# Altium footprint library Footprint-Lib-PhilsLab.PcbLib: 544 footprints (part 22 of 34)
Each footprint in its own frame and in the unit in brackets; x right, y up, seen from the top. Pads: shape width x height; smd on the part's side, far side on the other; paste and mask are expansions set on the pad; w line width, h text height; cw(c..) or ccw(c..) is an arc to the next point about the centre after c.
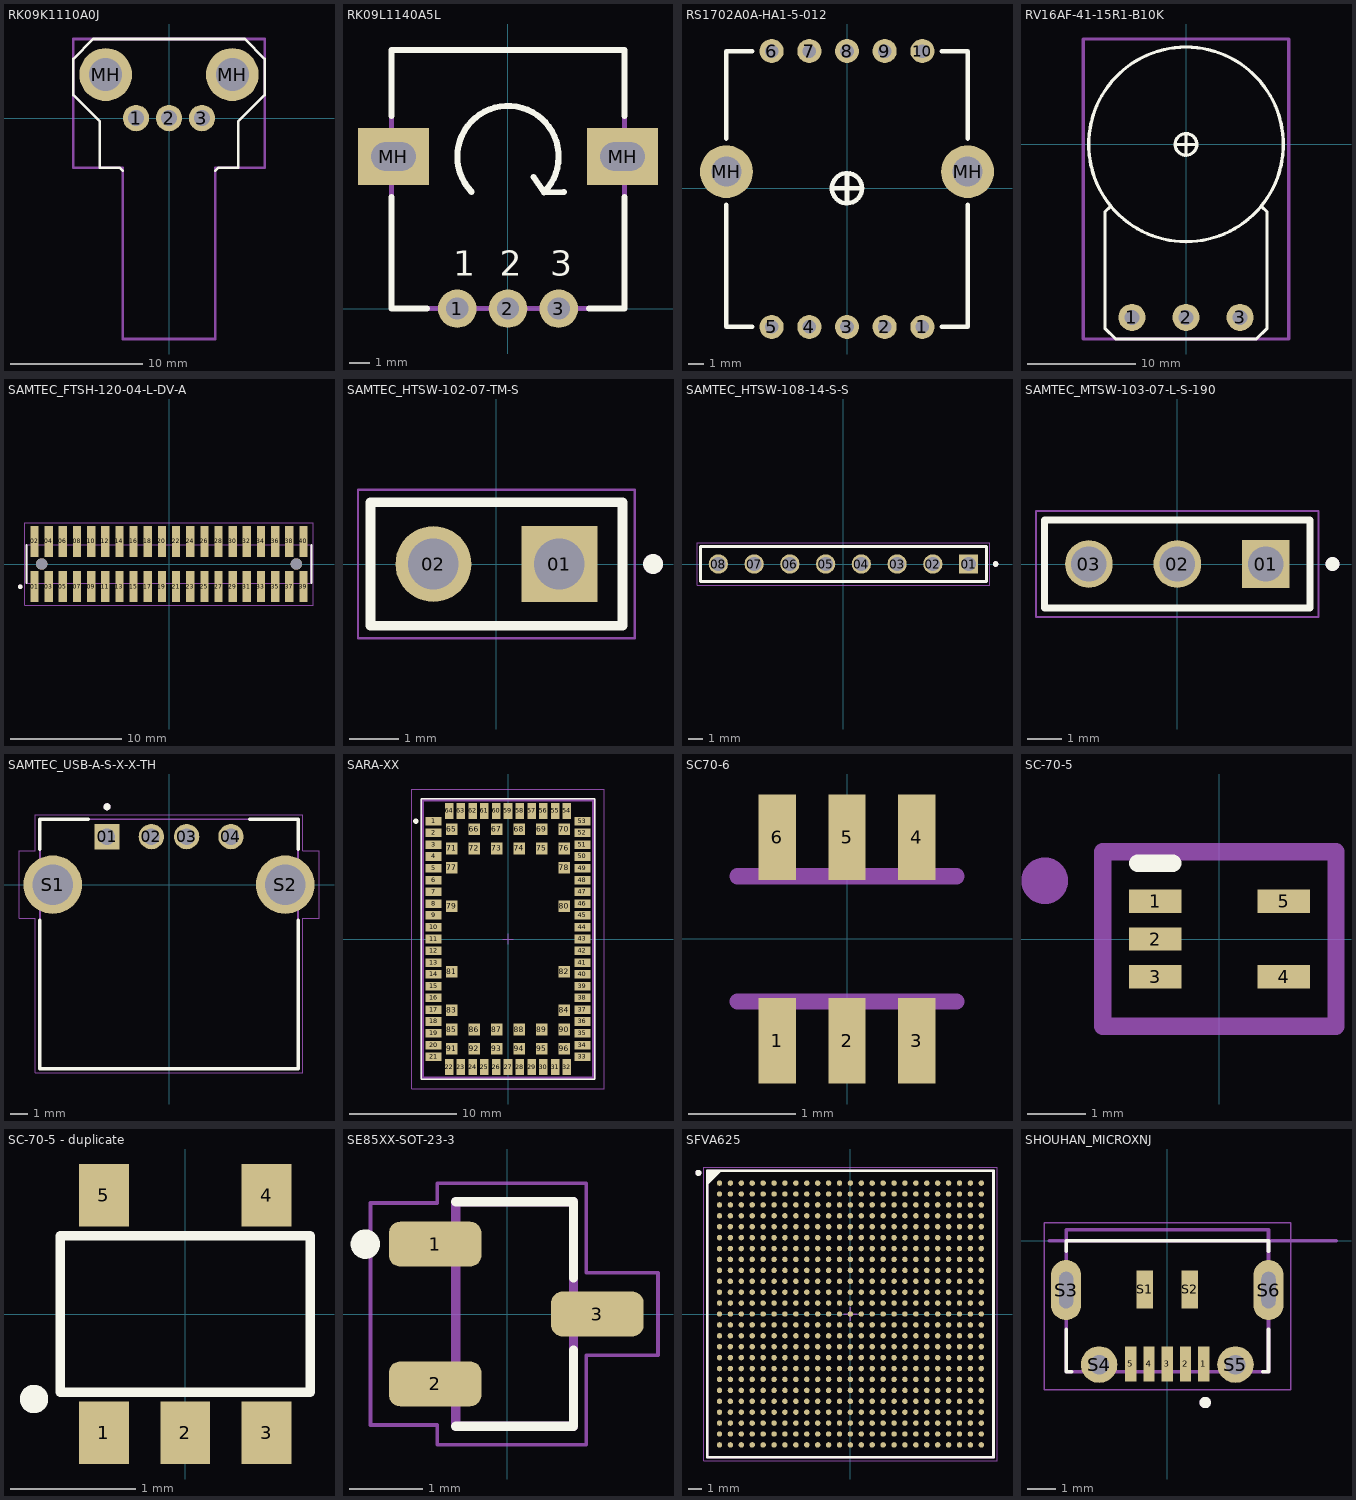
[diagram p21: the footprints below, top view; thin cyan lines are the x and y axes]

## RK09K1110A0J [mm]
pads (5):
  round 2 hole 1.2 mask+0.07: 1(-2.5,0) 2(0,0) 3(2.5,0)
  round 4 hole 2.5 mask+0.07: MH(-4.8,3.3) MH(4.8,3.3)
Top Overlay:
  lines w0.2: -3.5,-4 -3.75,-3.75 -5.25,-3.75 -5.25,-0.25 -7.25,1.75 -7.25,4.5 -5.75,6 -5.5,6 5.75,6 7.25,4.5 7.25,1.75 5.25,-0.25 5.25,-3.75 3.75,-3.75 3.5,-4
Mechanical 13:
  lines w0.2: -7.25,-3.75 -3.5,-3.75 -3.5,-16.75 3.5,-16.75 3.5,-3.75 7.25,-3.75 7.25,6 -7.25,6 -7.25,-3.75
  text "'.Designator'" at -7.231,-1.087 h1.25
3D body "RK09K1110-20.STEP": height 12.01, standoff -3.79, extent -4.9,-16.65 4.9,5.65

## RK09L1140A5L [mm]
pads (5):
  round 1.9 hole 1.1: 1(-2.5,0) 2(0,0) 3(2.5,0)
  rect 3.5x2.8 hole 1.4 slot 2.2 at 0 deg: MH(-5.65,7.5) MH(5.65,7.5)
Top Overlay:
  lines w0.3: -5.75,5.5 -5.75,0 -4,0 ; -5.75,9.5 -5.75,12.75 5.75,12.75 5.75,9.5 ; -1.798,5.763 cw(c0,7.5) 1.768,5.732 ; 1.25,6.5 1.768,5.732 ; 2.75,5.75 1.768,5.732 ; 4,0 5.75,0 5.75,5.5
  text "1" at -2.708,1.625 h1.25
  text "2" at -0.417,1.625 h1.25
  text "3" at 2.083,1.625 h1.25
Mechanical 13:
  lines w0.254: -5.75,0 -5.75,12.75 5.75,12.75 5.75,0 -5.75,0
  text "'.Designator'" at -5.665,7.083 h1
  text "1" at -2.667,1.75 h1
  text "2" at -0.333,1.75 h1
  text "3" at 2.167,1.75 h1
3D body "RK09L1140-F15.STEP": height 25.01, standoff -3.49, extent -6.048,-0.15 6.05,12.35

## RS1702A0A-HA1-5-012 [mm]
pads (12):
  round 1.6 hole 0.9: 1(5,-9.2) 2(2.5,-9.2) 3(0,-9.2) 4(-2.5,-9.2) 5(-5,-9.2) 6(-5,9.1) 7(-2.5,9.1) 8(0,9.1) 9(2.5,9.1) 10(5,9.1)
  round 3.5 hole 2: MH(-8,1.1) MH(8,1.1)
Top Overlay:
  circle w0.3: c0,0 r1
  lines w0.3: -8,-1.1 -8,-9.2 -6.3,-9.2 ; -8,3.3 -8,9.1 -6.3,9.1 ; -1,0 1,0 ; 0,-1 0,1 ; 6.3,-9.2 8,-9.2 8,-1.1 ; 6.3,9.1 8,9.1 8,3.3

## RV16AF-41-15R1-B10K [mm]
pads (3):
  round 2.5 hole 1.4: 1(-5,-16) 2(0,-16) 3(5,-16)
Top Overlay:
  circle w0.3: c0,0 r1
  circle w0.3: c0,0 r9
  lines w0.3: -7,-5.75 -7.5,-6.25 -7.5,-17 -6.5,-18 0,-18 6.5,-18 7.5,-17 7.5,-6.25 7,-5.75 ; -1,0 1,0 ; 0,-1 0,1
Mechanical 13:
  lines w0.3: -9.5,-18 -9.5,9.75 9.5,9.75 9.5,-18 0,-18 -9.5,-18
  text "'.Designator'" at -5.815,-0.9 h1
3D body "RV16AF-41-15R1-B10K.step": height 25.91, standoff -4.99, extent -8.5,-16.25 8.5,8.5

## SAMTEC_FTSH-120-04-L-DV-A [mm]
pads (42):
  rect 0.74x2.79 smd: 01(-12.065,-2.035) 02(-12.065,2.035) 03(-10.795,-2.035) 04(-10.795,2.035) 05(-9.525,-2.035) 06(-9.525,2.035) 07(-8.255,-2.035) 08(-8.255,2.035) 09(-6.985,-2.035) 10(-6.985,2.035) 11(-5.715,-2.035) 12(-5.715,2.035) 13(-4.445,-2.035) 14(-4.445,2.035) 15(-3.175,-2.035) 16(-3.175,2.035) 17(-1.905,-2.035) 18(-1.905,2.035) 19(-0.635,-2.035) 20(-0.635,2.035) 21(0.635,-2.035) 22(0.635,2.035) 23(1.905,-2.035) 24(1.905,2.035) 25(3.175,-2.035) 26(3.175,2.035) 27(4.445,-2.035) 28(4.445,2.035) 29(5.715,-2.035) 30(5.715,2.035) 31(6.985,-2.035) 32(6.985,2.035) 33(8.255,-2.035) 34(8.255,2.035) 35(9.525,-2.035) 36(9.525,2.035) 37(10.795,-2.035) 38(10.795,2.035) 39(12.065,-2.035) 40(12.065,2.035)
  round 1.02 hole 1.02 unplated: ""(-11.43,0) ""(11.43,0)
Top Overlay:
  circle w0.2: c-13.35,-2.035 r0.1
  lines w0.2: -12.785,-1.715 -12.785,1.715 ; 12.785,-1.715 12.785,1.715
Mechanical 13:
  circle w0.2: c-13.35,-2.035 r0.1
  lines w0.1: -12.7,-1.715 -12.7,1.715 ; -12.7,-1.715 12.7,-1.715 ; -12.7,-1.715 -12.7,1.715 ; -12.7,1.715 12.7,1.715 ; -12.7,1.715 12.7,1.715 ; 12.7,-1.715 12.7,1.715 ; 12.7,-1.715 12.7,1.715
Mechanical 15:
  lines w0.05: -12.95,-3.68 -12.95,3.68 12.95,3.68 12.95,-3.68 -12.95,-3.68
3D body "FTSH-120-04-L-DV-A.stp": height 6.82, standoff -0.77, extent -12.7,-2.921 12.7,2.921

## SAMTEC_HTSW-102-07-TM-S [mm]
pads (2):
  rect 1.53x1.53 hole 1.02: 01(1.27,0)
  round 1.53 hole 1.02: 02(-1.27,0)
Top Overlay:
  circle w0.2: c3.16,0 r0.1
  lines w0.2: -2.54,-1.245 -2.54,1.245 2.54,1.245 2.54,-1.245 -2.54,-1.245
Mechanical 13:
  circle w0.2: c3.16,0 r0.1
  lines w0.1: -2.54,-1.245 -2.54,1.245 2.54,1.245 2.54,-1.245 -2.54,-1.245
Mechanical 15:
  lines w0.05: -2.79,-1.495 -2.79,1.495 2.79,1.495 2.79,-1.495 -2.79,-1.495

## SAMTEC_HTSW-108-14-S-S [mm]
pads (8):
  rect 1.37x1.37 hole 1.02: 01(8.89,0)
  round 1.37 hole 1.02: 02(6.35,0) 03(3.81,0) 04(1.27,0) 05(-1.27,0) 06(-3.81,0) 07(-6.35,0) 08(-8.89,0)
Top Overlay:
  circle w0.2: c10.81,0 r0.1
  lines w0.2: -10.16,-1.245 -10.16,1.245 10.16,1.245 10.16,-1.245 -10.16,-1.245
Mechanical 13:
  circle w0.2: c10.81,0 r0.1
  lines w0.1: -10.16,-1.245 -10.16,1.245 10.16,1.245 10.16,-1.245 -10.16,-1.245
Mechanical 15:
  lines w0.05: -10.41,-1.495 -10.41,1.495 10.41,1.495 10.41,-1.495 -10.41,-1.495

## SAMTEC_MTSW-103-07-L-S-190 [mm]
pads (3):
  rect 1.37x1.37 / inner round 1.37 / far side rect 1.37x1.37 hole 1.02: 01(2.54,0)
  round 1.37 hole 1.02: 02(0,0) 03(-2.54,0)
Top Overlay:
  circle w0.2: c4.46,0 r0.1
  lines w0.2: -3.81,-1.27 -3.81,1.27 3.81,1.27 3.81,-1.27 -3.81,-1.27
Mechanical 13:
  circle w0.2: c4.46,0 r0.1
  lines w0.1: -3.81,-1.27 -3.81,1.27 ; -3.81,-1.27 3.81,-1.27 ; -3.81,-1.27 -3.81,1.27 ; -3.81,1.27 3.81,1.27 ; -3.81,1.27 3.81,1.27 ; 3.81,-1.27 3.81,1.27 ; 3.81,-1.27 3.81,1.27
Mechanical 15:
  lines w0.05: -4.06,-1.52 -4.06,1.52 4.06,1.52 4.06,-1.52 -4.06,-1.52

## SAMTEC_USB-A-S-X-X-TH [mm]
height 7.08
pads (6):
  rect 1.428x1.428 / inner round 1.428 / far side rect 1.428x1.428 hole 0.92: 01(-3.5,2.71)
  round 1.428 hole 0.92: 02(-1,2.71) 03(1,2.71) 04(3.5,2.71)
  round 3.316 hole 2.3: S1(-6.57,0) S2(6.57,0)
Top Overlay:
  circle w0.2: c-3.5,4.4 r0.1
  lines w0.2: -7.3,-2.01 -7.3,-10.4 7.3,-10.4 7.3,-2.01 ; -7.3,2.01 -7.3,3.7 -4.565,3.7 ; 4.565,3.7 7.3,3.7 7.3,2.01
Mechanical 13:
  circle w0.2: c-3.5,4.4 r0.1
  lines w0.1: -7.3,-10.4 7.3,-10.4 7.3,3.7 -7.3,3.7 -7.3,-10.4
Mechanical 15:
  lines w0.05: -8.48,-1.91 -7.55,-1.91 -7.55,-10.65 7.55,-10.65 7.55,-1.91 8.48,-1.91 8.48,1.91 7.55,1.91 7.55,3.95 -7.55,3.95 -7.55,1.91 -8.48,1.91 -8.48,-1.91
3D body "USB-A-S-S-B-TH-R.stp": height 7.47, standoff -4.42, extent -7.774,-10.55 7.974,3.55

## SARA-XX [mm] "GSM/GPRS and GSM/EGPRS/HSPA Cellular Module"
height 3.25
pads (96):
  rect 1.5x0.8 smd mask+0.22: 1(-6.95,11) 2(-6.95,9.9) 3(-6.95,8.8) 4(-6.95,7.7) 5(-6.95,6.6) 6(-6.95,5.5) 7(-6.95,4.4) 8(-6.95,3.3) 9(-6.95,2.2) 10(-6.95,1.1) 11(-6.95,0) 12(-6.95,-1.1) 13(-6.95,-2.2) 14(-6.95,-3.3) 15(-6.95,-4.4) 16(-6.95,-5.5) 17(-6.95,-6.6) 18(-6.95,-7.7) 19(-6.95,-8.8) 20(-6.95,-9.9) 21(-6.95,-11) 33(6.95,-11) 34(6.95,-9.9) 35(6.95,-8.8) 36(6.95,-7.7) 37(6.95,-6.6) 38(6.95,-5.5) 39(6.95,-4.4) 40(6.95,-3.3) 41(6.95,-2.2) 42(6.95,-1.1) 43(6.95,0) 44(6.95,1.1) 45(6.95,2.2) 46(6.95,3.3) 47(6.95,4.4) 48(6.95,5.5) 49(6.95,6.6) 50(6.95,7.7) 51(6.95,8.8) 52(6.95,9.9) 53(6.95,11)
  rect 0.8x1.5 smd mask+0.22: 22(-5.5,-11.95) 23(-4.4,-11.95) 24(-3.3,-11.95) 25(-2.2,-11.95) 26(-1.1,-11.95) 27(0,-11.95) 28(1.1,-11.95) 29(2.2,-11.95) 30(3.3,-11.95) 31(4.4,-11.95) 32(5.5,-11.95) 54(5.5,11.95) 55(4.4,11.95) 56(3.3,11.95) 57(2.2,11.95) 58(1.1,11.95) 59(0,11.95) 60(-1.1,11.95) 61(-2.2,11.95) 62(-3.3,11.95) 63(-4.4,11.95) 64(-5.5,11.95)
  rect 1.1x1.1 smd mask+0.22: 65(-5.25,10.25) 66(-3.15,10.25) 67(-1.05,10.25) 68(1.05,10.25) 69(3.15,10.25) 70(5.25,10.25) 71(-5.25,8.45) 72(-3.15,8.45) 73(-1.05,8.45) 74(1.05,8.45) 75(3.15,8.45) 76(5.25,8.45) 77(-5.25,6.65) 78(5.25,6.65) 79(-5.25,3.05) 80(5.25,3.05) 81(-5.25,-3.05) 82(5.25,-3.05) 83(-5.25,-6.65) 84(5.25,-6.65) 85(-5.25,-8.45) 86(-3.15,-8.45) 87(-1.05,-8.45) 88(1.05,-8.45) 89(3.15,-8.45) 90(5.25,-8.45) 91(-5.25,-10.25) 92(-3.15,-10.25) 93(-1.05,-10.25) 94(1.05,-10.25) 95(3.15,-10.25) 96(5.25,-10.25)
Top Overlay:
  circle w0.4: c-8.6,11 r0.05
  lines w0.15: -8.1,-13.1 -8.1,13.1 8.1,13.1 8.1,-13.1 -8.1,-13.1
Mechanical 13:
  circle w0.4: c-7,11 r0.05
  lines w0.3: -8,-13 -8,13 8,13 8,-13 -8,-13
  text "'.Designator'" at -5.815,-0.9 h1
Mechanical 15:
  lines w0.05: -9,-14 -9,14 9,14 9,-14 -9,-14
  lines w0.1: -0.5,0 0,0 0.5,0 ; 0,-0.5 0,0.5
3D body "SARA-R5xx.STEP": height 2.23, standoff 0.03, extent -7.998,-12.999 8.002,13.001

## SC70-6 [mm]
pads (6):
  rect 0.35x0.8 smd paste-1 mask+0: 1(-0.65,-0.95) 2(0,-0.95) 3(0.65,-0.95) 4(0.65,0.95) 5(0,0.95) 6(-0.65,0.95)
Top Paste:
  region: -0.5,-1.326 -0.801,-1.326 -0.801,-0.575 -0.5,-0.575
  region: 0.15,-1.326 -0.15,-1.326 -0.15,-0.575 0.15,-0.575
  region: 0.8,-1.326 0.5,-1.326 0.5,-0.575 0.8,-0.575
  region: 0.8,0.575 0.5,0.575 0.5,1.325 0.8,1.325
  region: 0.15,0.575 -0.15,0.575 -0.15,1.325 0.15,1.325
  region: -0.5,0.576 -0.802,0.576 -0.802,1.325 -0.5,1.325
Top Solder:
  region: -0.425,-1.401 -0.875,-1.401 -0.875,-0.5 -0.425,-0.5
  region: 0.225,-1.401 -0.225,-1.401 -0.225,-0.5 0.225,-0.5
  region: 0.875,-1.402 0.426,-1.402 0.426,-0.5 0.875,-0.5
  region: 0.875,0.5 0.425,0.5 0.425,1.4 0.875,1.4
  region: 0.225,0.501 -0.225,0.501 -0.225,1.4 0.225,1.4
  region: -0.425,0.5 -0.875,0.5 -0.875,1.4 -0.425,1.4
Mechanical 13:
  region: 0.15,-1.2 -0.15,-1.2 -0.15,-0.625 0.15,-0.625
  region: -0.5,-1.202 -0.801,-1.202 -0.801,-0.625 -0.5,-0.625
  region: 0.8,-1.201 0.5,-1.201 0.5,-0.625 0.8,-0.625
  region: 0.8,0.626 0.501,0.626 0.501,1.2 0.8,1.2
  region: 0.15,0.626 -0.15,0.626 -0.15,1.2 0.15,1.2
  region: -0.5,0.626 -0.801,0.626 -0.801,1.2 -0.5,1.2
  lines w0.152: -1.022,-0.585 1.022,-0.585 ; -1.022,0.585 1.022,0.585

## SC-70-5 [mm]
pads (5):
  rect 0.9x0.4 smd mask+0.15: 1(-1.1,0.65) 2(-1.1,0) 3(-1.1,-0.65) 4(1.1,-0.65) 5(1.1,0.65)
Top Overlay:
  lines w0.3: -1.4,1.3 -0.8,1.3
Mechanical 13:
  circle w0.5: c-3,1 r0.149
  lines w0.3: -2,-1.5 2,-1.5 2,1.5 -2,1.5 -2,-1.5
  text "'.Designator'" at -5.815,-0.9 h1
3D body "SC-70-5.step": height 0.96, standoff 0.01, extent -1.05,-1 1.05,1

## SC-70-5 - duplicate [mm]
pads (5):
  rect 0.4x0.5 smd: 1(-0.65,-0.95) 2(0,-0.95) 3(0.65,-0.95) 4(0.65,0.95) 5(-0.65,0.95)
Top Overlay:
  circle w0.127: c-1.21,-0.68 r0.05
  lines w0.076: -1,-0.625 1,-0.625 1,0.625 -1,0.625 -1,-0.625
3D body "step_temp.STEP": height 1.1, standoff 0, extent -1.05,-1 1.05,1

## SE85XX-SOT-23-3 [mm]
pads (3):
  rrect50% 1.26x0.61 smd: 1(-0.98,0.95) 2(-0.98,-0.95) 3(1.225,0)
Top Overlay:
  circle w0.2: c-1.93,0.95 r0.1
  lines w0.127: -0.7,-1.525 0.9,-1.525 0.9,-0.489 ; -0.7,1.525 0.9,1.525 0.9,0.489
Mechanical 13:
  lines w0.127: -0.7,-1.525 0.9,-1.525 0.9,1.525 -0.7,1.525 -0.7,-1.525
Mechanical 15:
  lines w0.05: -1.86,-1.51 -0.95,-1.51 -0.95,-1.78 1.075,-1.78 1.075,-0.56 2.05,-0.56 2.05,0.56 1.075,0.56 1.075,1.78 -0.95,1.78 -0.95,1.51 -1.86,1.51 -1.86,-1.51

## SFVA625 [mm]
height 3.43
pads (625):
  round 0.4 smd mask+0.08: A1(-9.6,9.6) A2(-8.8,9.6) A3(-8,9.6) A4(-7.2,9.6) A5(-6.4,9.6) A6(-5.6,9.6) A7(-4.8,9.6) A8(-4,9.6) A9(-3.2,9.6) A10(-2.4,9.6) A11(-1.6,9.6) A12(-0.8,9.6) A13(0,9.6) A14(0.8,9.6) A15(1.6,9.6) A16(2.4,9.6) A17(3.2,9.6) A18(4,9.6) A19(4.8,9.6) A20(5.6,9.6) A21(6.4,9.6) A22(7.2,9.6) A23(8,9.6) A24(8.8,9.6) A25(9.6,9.6) AA1(-9.6,-6.4) AA2(-8.8,-6.4) AA3(-8,-6.4) AA4(-7.2,-6.4) AA5(-6.4,-6.4) AA6(-5.6,-6.4) AA7(-4.8,-6.4) AA8(-4,-6.4) AA9(-3.2,-6.4) AA10(-2.4,-6.4) AA11(-1.6,-6.4) AA12(-0.8,-6.4) AA13(0,-6.4) AA14(0.8,-6.4) AA15(1.6,-6.4) AA16(2.4,-6.4) AA17(3.2,-6.4) AA18(4,-6.4) AA19(4.8,-6.4) AA20(5.6,-6.4) AA21(6.4,-6.4) AA22(7.2,-6.4) AA23(8,-6.4) AA24(8.8,-6.4) AA25(9.6,-6.4) AB1(-9.6,-7.2) AB2(-8.8,-7.2) AB3(-8,-7.2) AB4(-7.2,-7.2) AB5(-6.4,-7.2) AB6(-5.6,-7.2) AB7(-4.8,-7.2) AB8(-4,-7.2) AB9(-3.2,-7.2) AB10(-2.4,-7.2) AB11(-1.6,-7.2) AB12(-0.8,-7.2) AB13(0,-7.2) AB14(0.8,-7.2) AB15(1.6,-7.2) AB16(2.4,-7.2) AB17(3.2,-7.2) AB18(4,-7.2) AB19(4.8,-7.2) AB20(5.6,-7.2) AB21(6.4,-7.2) AB22(7.2,-7.2) AB23(8,-7.2) AB24(8.8,-7.2) AB25(9.6,-7.2) AC1(-9.6,-8) AC2(-8.8,-8) AC3(-8,-8) AC4(-7.2,-8) AC5(-6.4,-8) AC6(-5.6,-8) AC7(-4.8,-8) AC8(-4,-8) AC9(-3.2,-8) AC10(-2.4,-8) AC11(-1.6,-8) AC12(-0.8,-8) AC13(0,-8) AC14(0.8,-8) AC15(1.6,-8) AC16(2.4,-8) AC17(3.2,-8) AC18(4,-8) AC19(4.8,-8) AC20(5.6,-8) AC21(6.4,-8) AC22(7.2,-8) AC23(8,-8) AC24(8.8,-8) AC25(9.6,-8) AD1(-9.6,-8.8) AD2(-8.8,-8.8) AD3(-8,-8.8) AD4(-7.2,-8.8) AD5(-6.4,-8.8) AD6(-5.6,-8.8) AD7(-4.8,-8.8) AD8(-4,-8.8) AD9(-3.2,-8.8) AD10(-2.4,-8.8) AD11(-1.6,-8.8) AD12(-0.8,-8.8) AD13(0,-8.8) AD14(0.8,-8.8) AD15(1.6,-8.8) AD16(2.4,-8.8) AD17(3.2,-8.8) AD18(4,-8.8) AD19(4.8,-8.8) AD20(5.6,-8.8) AD21(6.4,-8.8) AD22(7.2,-8.8) AD23(8,-8.8) AD24(8.8,-8.8) AD25(9.6,-8.8) AE1(-9.6,-9.6) AE2(-8.8,-9.6) AE3(-8,-9.6) AE4(-7.2,-9.6) AE5(-6.4,-9.6) AE6(-5.6,-9.6) AE7(-4.8,-9.6) AE8(-4,-9.6) AE9(-3.2,-9.6) AE10(-2.4,-9.6) AE11(-1.6,-9.6) AE12(-0.8,-9.6) AE13(0,-9.6) AE14(0.8,-9.6) AE15(1.6,-9.6) AE16(2.4,-9.6) AE17(3.2,-9.6) AE18(4,-9.6) AE19(4.8,-9.6) AE20(5.6,-9.6) AE21(6.4,-9.6) AE22(7.2,-9.6) AE23(8,-9.6) AE24(8.8,-9.6) AE25(9.6,-9.6) B1(-9.6,8.8) B2(-8.8,8.8) B3(-8,8.8) B4(-7.2,8.8) B5(-6.4,8.8) B6(-5.6,8.8) B7(-4.8,8.8) B8(-4,8.8) B9(-3.2,8.8) B10(-2.4,8.8) B11(-1.6,8.8) B12(-0.8,8.8) B13(0,8.8) B14(0.8,8.8) B15(1.6,8.8) B16(2.4,8.8) B17(3.2,8.8) B18(4,8.8) B19(4.8,8.8) B20(5.6,8.8) B21(6.4,8.8) B22(7.2,8.8) B23(8,8.8) B24(8.8,8.8) B25(9.6,8.8) C1(-9.6,8) C2(-8.8,8) C3(-8,8) C4(-7.2,8) C5(-6.4,8) C6(-5.6,8) C7(-4.8,8) C8(-4,8) C9(-3.2,8) C10(-2.4,8) C11(-1.6,8) C12(-0.8,8) C13(0,8) C14(0.8,8) C15(1.6,8) C16(2.4,8) C17(3.2,8) C18(4,8) C19(4.8,8) C20(5.6,8) C21(6.4,8) C22(7.2,8) C23(8,8) C24(8.8,8) C25(9.6,8) D1(-9.6,7.2) D2(-8.8,7.2) D3(-8,7.2) D4(-7.2,7.2) D5(-6.4,7.2) D6(-5.6,7.2) D7(-4.8,7.2) D8(-4,7.2) D9(-3.2,7.2) D10(-2.4,7.2) D11(-1.6,7.2) D12(-0.8,7.2) D13(0,7.2) D14(0.8,7.2) D15(1.6,7.2) D16(2.4,7.2) D17(3.2,7.2) D18(4,7.2) D19(4.8,7.2) D20(5.6,7.2) D21(6.4,7.2) D22(7.2,7.2) D23(8,7.2) D24(8.8,7.2) D25(9.6,7.2) E1(-9.6,6.4) E2(-8.8,6.4) E3(-8,6.4) E4(-7.2,6.4) E5(-6.4,6.4) E6(-5.6,6.4) E7(-4.8,6.4) E8(-4,6.4) E9(-3.2,6.4) E10(-2.4,6.4) E11(-1.6,6.4) E12(-0.8,6.4) E13(0,6.4) E14(0.8,6.4) E15(1.6,6.4) E16(2.4,6.4) E17(3.2,6.4) E18(4,6.4) E19(4.8,6.4) E20(5.6,6.4) E21(6.4,6.4) E22(7.2,6.4) E23(8,6.4) E24(8.8,6.4) E25(9.6,6.4) F1(-9.6,5.6) F2(-8.8,5.6) F3(-8,5.6) F4(-7.2,5.6) F5(-6.4,5.6) F6(-5.6,5.6) F7(-4.8,5.6) F8(-4,5.6) F9(-3.2,5.6) F10(-2.4,5.6) F11(-1.6,5.6) F12(-0.8,5.6) F13(0,5.6) F14(0.8,5.6) F15(1.6,5.6) F16(2.4,5.6) F17(3.2,5.6) F18(4,5.6) F19(4.8,5.6) F20(5.6,5.6) F21(6.4,5.6) F22(7.2,5.6) F23(8,5.6) F24(8.8,5.6) F25(9.6,5.6) G1(-9.6,4.8) G2(-8.8,4.8) G3(-8,4.8) G4(-7.2,4.8) G5(-6.4,4.8) G6(-5.6,4.8) G7(-4.8,4.8) G8(-4,4.8) G9(-3.2,4.8) G10(-2.4,4.8) G11(-1.6,4.8) G12(-0.8,4.8) G13(0,4.8) G14(0.8,4.8) G15(1.6,4.8) G16(2.4,4.8) G17(3.2,4.8) G18(4,4.8) G19(4.8,4.8) G20(5.6,4.8) G21(6.4,4.8) G22(7.2,4.8) G23(8,4.8) G24(8.8,4.8) G25(9.6,4.8) H1(-9.6,4) H2(-8.8,4) H3(-8,4) H4(-7.2,4) H5(-6.4,4) H6(-5.6,4) H7(-4.8,4) H8(-4,4) H9(-3.2,4) H10(-2.4,4) H11(-1.6,4) H12(-0.8,4) H13(0,4) H14(0.8,4) H15(1.6,4) H16(2.4,4) H17(3.2,4) H18(4,4) H19(4.8,4) H20(5.6,4) H21(6.4,4) H22(7.2,4) H23(8,4) H24(8.8,4) H25(9.6,4) J1(-9.6,3.2) J2(-8.8,3.2) J3(-8,3.2) J4(-7.2,3.2) J5(-6.4,3.2) J6(-5.6,3.2) J7(-4.8,3.2) J8(-4,3.2) J9(-3.2,3.2) J10(-2.4,3.2) J11(-1.6,3.2) J12(-0.8,3.2) J13(0,3.2) J14(0.8,3.2) J15(1.6,3.2) J16(2.4,3.2) J17(3.2,3.2) J18(4,3.2) J19(4.8,3.2) J20(5.6,3.2) J21(6.4,3.2) J22(7.2,3.2) J23(8,3.2) J24(8.8,3.2) J25(9.6,3.2) K1(-9.6,2.4) K2(-8.8,2.4) K3(-8,2.4) K4(-7.2,2.4) K5(-6.4,2.4) K6(-5.6,2.4) K7(-4.8,2.4) K8(-4,2.4) K9(-3.2,2.4) K10(-2.4,2.4) K11(-1.6,2.4) K12(-0.8,2.4) K13(0,2.4) K14(0.8,2.4) K15(1.6,2.4) K16(2.4,2.4) K17(3.2,2.4) K18(4,2.4) K19(4.8,2.4) K20(5.6,2.4) K21(6.4,2.4) K22(7.2,2.4) K23(8,2.4) K24(8.8,2.4) K25(9.6,2.4) L1(-9.6,1.6) L2(-8.8,1.6) L3(-8,1.6) L4(-7.2,1.6) L5(-6.4,1.6) L6(-5.6,1.6) L7(-4.8,1.6) L8(-4,1.6) L9(-3.2,1.6) L10(-2.4,1.6) L11(-1.6,1.6) L12(-0.8,1.6) L13(0,1.6) L14(0.8,1.6) L15(1.6,1.6) L16(2.4,1.6) L17(3.2,1.6) L18(4,1.6) L19(4.8,1.6) L20(5.6,1.6) L21(6.4,1.6) L22(7.2,1.6) L23(8,1.6) L24(8.8,1.6) L25(9.6,1.6) M1(-9.6,0.8) M2(-8.8,0.8) M3(-8,0.8) M4(-7.2,0.8) M5(-6.4,0.8) M6(-5.6,0.8) M7(-4.8,0.8) M8(-4,0.8) M9(-3.2,0.8) M10(-2.4,0.8) M11(-1.6,0.8) M12(-0.8,0.8) M13(0,0.8) M14(0.8,0.8) M15(1.6,0.8) M16(2.4,0.8) M17(3.2,0.8) M18(4,0.8) M19(4.8,0.8) M20(5.6,0.8) M21(6.4,0.8) M22(7.2,0.8) M23(8,0.8) M24(8.8,0.8) M25(9.6,0.8) N1(-9.6,0) N2(-8.8,0) N3(-8,0) N4(-7.2,0) N5(-6.4,0) N6(-5.6,0) N7(-4.8,0) N8(-4,0) N9(-3.2,0) N10(-2.4,0) N11(-1.6,0) N12(-0.8,0) N13(0,0) N14(0.8,0) N15(1.6,0) N16(2.4,0) N17(3.2,0) N18(4,0) N19(4.8,0) N20(5.6,0) N21(6.4,0) N22(7.2,0) N23(8,0) N24(8.8,0) N25(9.6,0) P1(-9.6,-0.8) P2(-8.8,-0.8) P3(-8,-0.8) P4(-7.2,-0.8) P5(-6.4,-0.8) P6(-5.6,-0.8) P7(-4.8,-0.8) P8(-4,-0.8) P9(-3.2,-0.8) P10(-2.4,-0.8) P11(-1.6,-0.8) P12(-0.8,-0.8) P13(0,-0.8) P14(0.8,-0.8) P15(1.6,-0.8) P16(2.4,-0.8) P17(3.2,-0.8) P18(4,-0.8) P19(4.8,-0.8) P20(5.6,-0.8) P21(6.4,-0.8) P22(7.2,-0.8) P23(8,-0.8) P24(8.8,-0.8) P25(9.6,-0.8) R1(-9.6,-1.6) R2(-8.8,-1.6) R3(-8,-1.6) R4(-7.2,-1.6) R5(-6.4,-1.6) R6(-5.6,-1.6) R7(-4.8,-1.6) R8(-4,-1.6) R9(-3.2,-1.6) R10(-2.4,-1.6) R11(-1.6,-1.6) R12(-0.8,-1.6) R13(0,-1.6) R14(0.8,-1.6) R15(1.6,-1.6) R16(2.4,-1.6) R17(3.2,-1.6) R18(4,-1.6) R19(4.8,-1.6) R20(5.6,-1.6) R21(6.4,-1.6) R22(7.2,-1.6) R23(8,-1.6) R24(8.8,-1.6) R25(9.6,-1.6) T1(-9.6,-2.4) T2(-8.8,-2.4) T3(-8,-2.4) T4(-7.2,-2.4) T5(-6.4,-2.4) T6(-5.6,-2.4) T7(-4.8,-2.4) T8(-4,-2.4) T9(-3.2,-2.4) T10(-2.4,-2.4) T11(-1.6,-2.4) T12(-0.8,-2.4) T13(0,-2.4) T14(0.8,-2.4) T15(1.6,-2.4) T16(2.4,-2.4) T17(3.2,-2.4) T18(4,-2.4) T19(4.8,-2.4) T20(5.6,-2.4) T21(6.4,-2.4) T22(7.2,-2.4) T23(8,-2.4) T24(8.8,-2.4) T25(9.6,-2.4) U1(-9.6,-3.2) U2(-8.8,-3.2) U3(-8,-3.2) U4(-7.2,-3.2) U5(-6.4,-3.2) U6(-5.6,-3.2) U7(-4.8,-3.2) U8(-4,-3.2) U9(-3.2,-3.2) U10(-2.4,-3.2) U11(-1.6,-3.2) U12(-0.8,-3.2) U13(0,-3.2) U14(0.8,-3.2) U15(1.6,-3.2) U16(2.4,-3.2) U17(3.2,-3.2) U18(4,-3.2) U19(4.8,-3.2) U20(5.6,-3.2) U21(6.4,-3.2) U22(7.2,-3.2) U23(8,-3.2) U24(8.8,-3.2) U25(9.6,-3.2) V1(-9.6,-4) V2(-8.8,-4) V3(-8,-4) V4(-7.2,-4) V5(-6.4,-4) V6(-5.6,-4) V7(-4.8,-4) V8(-4,-4) V9(-3.2,-4) V10(-2.4,-4) V11(-1.6,-4) V12(-0.8,-4) V13(0,-4) V14(0.8,-4) V15(1.6,-4) V16(2.4,-4) V17(3.2,-4) V18(4,-4) V19(4.8,-4) V20(5.6,-4) V21(6.4,-4) V22(7.2,-4) V23(8,-4) V24(8.8,-4) V25(9.6,-4) W1(-9.6,-4.8) W2(-8.8,-4.8) W3(-8,-4.8) W4(-7.2,-4.8) W5(-6.4,-4.8) W6(-5.6,-4.8) W7(-4.8,-4.8) W8(-4,-4.8) W9(-3.2,-4.8) W10(-2.4,-4.8) W11(-1.6,-4.8) W12(-0.8,-4.8) W13(0,-4.8) W14(0.8,-4.8) W15(1.6,-4.8) W16(2.4,-4.8) W17(3.2,-4.8) W18(4,-4.8) W19(4.8,-4.8) W20(5.6,-4.8) W21(6.4,-4.8) W22(7.2,-4.8) W23(8,-4.8) W24(8.8,-4.8) W25(9.6,-4.8) Y1(-9.6,-5.6) Y2(-8.8,-5.6) Y3(-8,-5.6) Y4(-7.2,-5.6) Y5(-6.4,-5.6) Y6(-5.6,-5.6) Y7(-4.8,-5.6) Y8(-4,-5.6) Y9(-3.2,-5.6) Y10(-2.4,-5.6) Y11(-1.6,-5.6) Y12(-0.8,-5.6) Y13(0,-5.6) Y14(0.8,-5.6) Y15(1.6,-5.6) Y16(2.4,-5.6) Y17(3.2,-5.6) Y18(4,-5.6) Y19(4.8,-5.6) Y20(5.6,-5.6) Y21(6.4,-5.6) Y22(7.2,-5.6) Y23(8,-5.6) Y24(8.8,-5.6) Y25(9.6,-5.6)
Top Overlay:
  circle w0.25: c-11.15,10.35 r0.1
  region: -9.584,10.5 -10.5,9.584 -10.5,10.5
  lines w0.2: -10.5,9.584 -9.584,10.5 ; -10.5,-10.5 -10.5,10.5 10.5,10.5 10.5,-10.5 -10.5,-10.5
Mechanical 13:
  circle w0.25: c-11.15,10.35 r0.1
  lines w0.2: -10.5,-10.5 -10.5,10.5 10.5,10.5 10.5,-10.5 -10.5,-10.5
  text ".Designator" at -4.998,-0.333 h1
Mechanical 15:
  lines w0.05: -10.75,-10.75 -10.75,10.75 10.75,10.75 10.75,-10.75 -10.75,-10.75
  lines w0.1: -0.5,0 0.5,0 ; 0,-0.5 0,0.5
3D body "SFVA625.step": height 3.43, standoff 0, extent -10.5,-10.5 10.5,10.5

## SHOUHAN_MICROXNJ [mm]
pads (11):
  rect 0.4x1.25 smd: 1(1.3,-4.375) 2(0.65,-4.375) 3(0,-4.375) 4(-0.65,-4.375) 5(-1.3,-4.375)
  rect 0.6x1.35 smd: S1(-0.8,-1.725) S2(0.8,-1.725)
  oval 1.07x2.14 hole 0.5 slot 1.3 at 90 deg: S3(-3.6,-1.75) S6(3.6,-1.75)
  round 1.3 hole 0.7: S4(-2.425,-4.4) S5(2.425,-4.4)
Top Overlay:
  circle w0.2: c1.35,-5.75 r0.1
  lines w0.127: -3.6,-3.14 -3.6,-4.66 -3.395,-4.66 ; -3.6,-0.36 -3.6,0 3.6,0 3.6,-0.36 ; 3.395,-4.66 3.6,-4.66 3.6,-3.14
Mechanical 13:
  circle w0.2: c1.35,-5.75 r0.1
  lines w0.127: -4.2,0 6,0 ; -3.6,-4.66 3.6,-4.66 3.6,0.4 -3.6,0.4 -3.6,-4.66
  text "PCB EDGE" at 4.35,0.15 h0.61
Mechanical 15:
  lines w0.05: -4.385,-5.3 4.385,-5.3 4.385,0.65 -4.385,0.65 -4.385,-5.3